# Altium footprint library 0805_1%_Resistor.PcbLib: 20 footprints (part 1 of 2)
Each footprint in its own frame and in the unit in brackets; x right, y up, seen from the top. Pads: shape width x height; smd on the part's side, far side on the other; paste and mask are expansions set on the pad; w line width, h text height; cw(c..) or ccw(c..) is an arc to the next point about the centre after c.
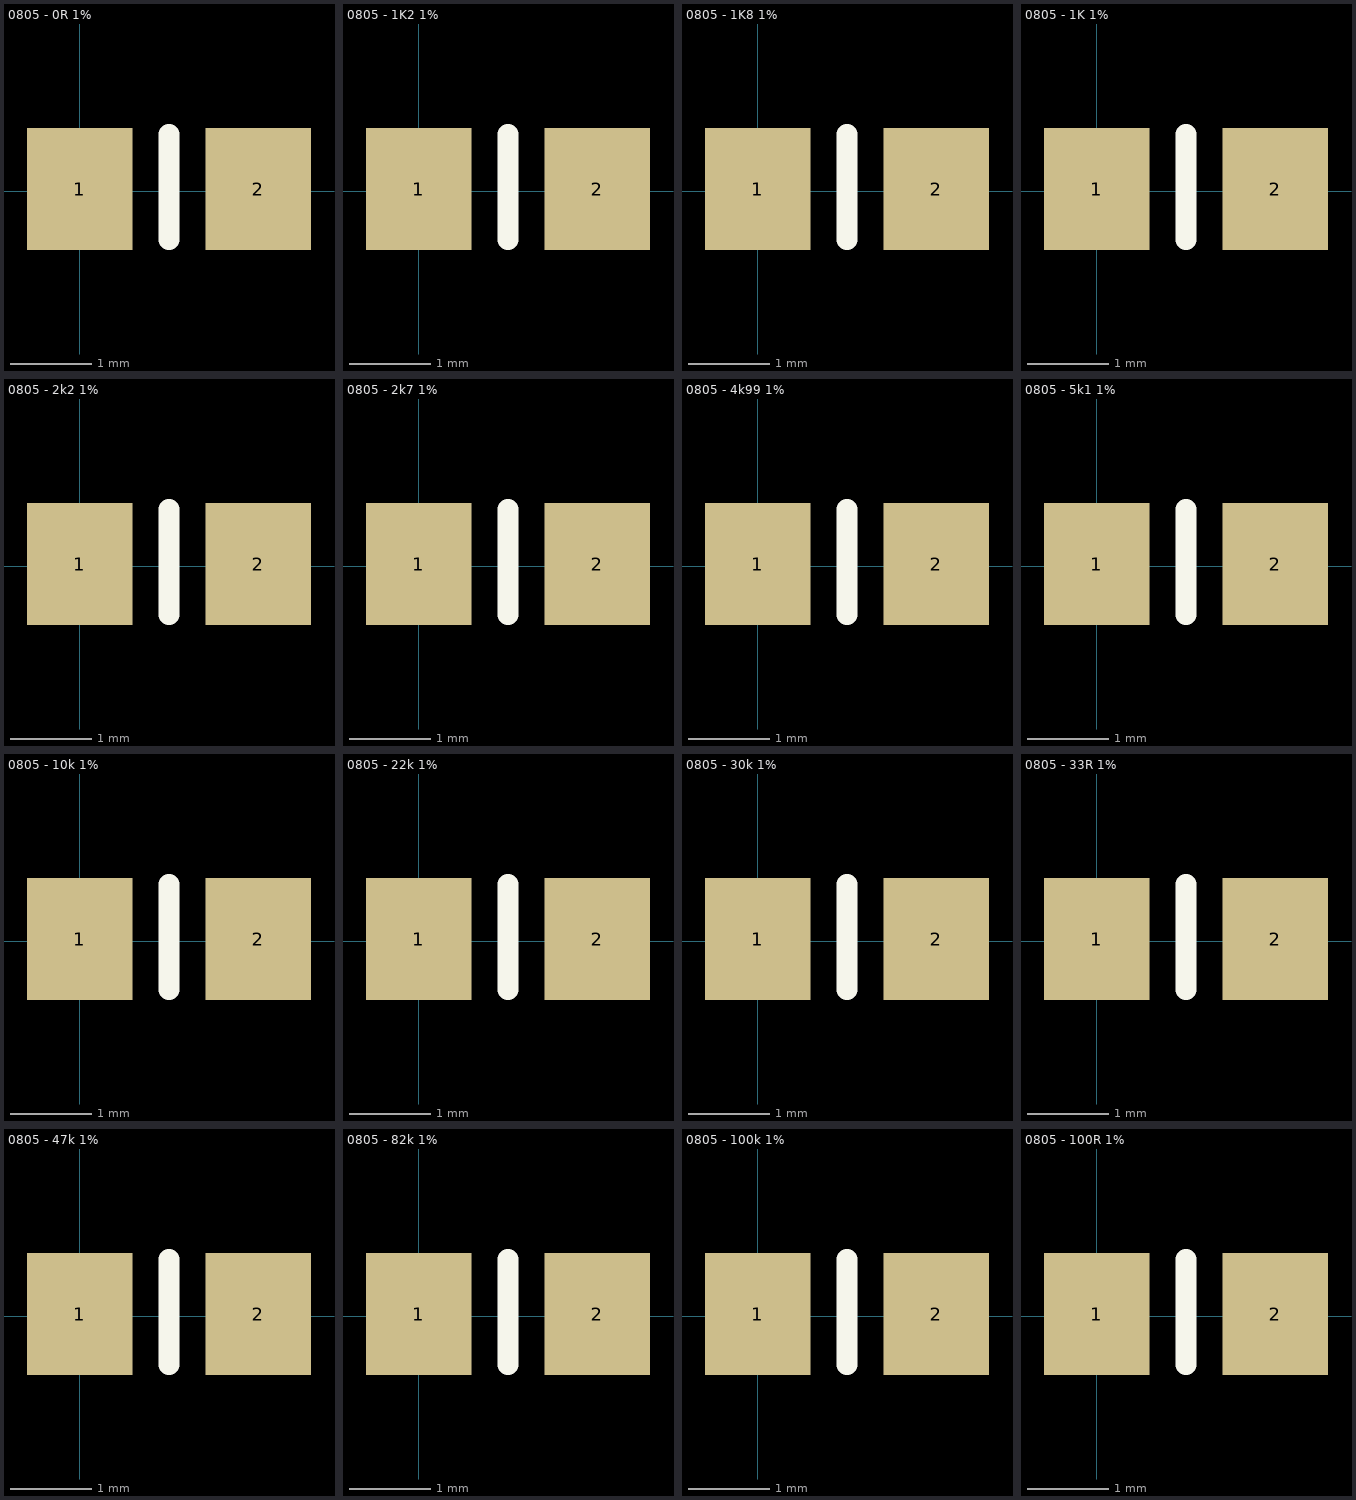
[diagram p0: the footprints below, top view; thin cyan lines are the x and y axes]

## 0805 - 0R 1% [mm]
pads (2):
  rect 1.3x1.5 smd: 1(0,0.025) 2(2.2,0.025)
Top Overlay:
  lines w0.254: 1.1,-0.6 1.1,0.7
3D body "0R.STEP": height 0.43, standoff -0.02, extent 0.125,-0.6 2.125,0.65

## 0805 - 1K2 1% [mm]
pads (2):
  rect 1.3x1.5 smd: 1(0,0.025) 2(2.2,0.025)
Top Overlay:
  lines w0.254: 1.1,-0.6 1.1,0.7
3D body "1k2.STEP": height 0.43, standoff -0.02, extent 0.125,-0.6 2.125,0.65

## 0805 - 1K8 1% [mm]
pads (2):
  rect 1.3x1.5 smd: 1(0,0.025) 2(2.2,0.025)
Top Overlay:
  lines w0.254: 1.1,-0.6 1.1,0.7
3D body "1k8 1%.STEP": height 0.43, standoff -0.02, extent 0.125,-0.6 2.125,0.65

## 0805 - 1K 1% [mm]
pads (2):
  rect 1.3x1.5 smd: 1(0,0.025) 2(2.2,0.025)
Top Overlay:
  lines w0.254: 1.1,-0.6 1.1,0.7
3D body "1k 1%.STEP": height 0.43, standoff -0.02, extent 0.125,-0.6 2.125,0.65

## 0805 - 2k2 1% [mm]
pads (2):
  rect 1.3x1.5 smd: 1(0,0.025) 2(2.2,0.025)
Top Overlay:
  lines w0.254: 1.1,-0.6 1.1,0.7
3D body "2k2.STEP": height 0.43, standoff -0.02, extent 0.125,-0.6 2.125,0.65

## 0805 - 2k7 1% [mm]
pads (2):
  rect 1.3x1.5 smd: 1(0,0.025) 2(2.2,0.025)
Top Overlay:
  lines w0.254: 1.1,-0.6 1.1,0.7
3D body "2k7 1%.STEP": height 0.43, standoff -0.02, extent 0.125,-0.6 2.125,0.65

## 0805 - 4k99 1% [mm]
pads (2):
  rect 1.3x1.5 smd: 1(0,0.025) 2(2.2,0.025)
Top Overlay:
  lines w0.254: 1.1,-0.6 1.1,0.7
3D body "4k99.STEP": height 0.43, standoff -0.02, extent 0.125,-0.6 2.125,0.65

## 0805 - 5k1 1% [mm]
pads (2):
  rect 1.3x1.5 smd: 1(0,0.025) 2(2.2,0.025)
Top Overlay:
  lines w0.254: 1.1,-0.6 1.1,0.7
3D body "5k1.STEP": height 0.43, standoff -0.02, extent 0.125,-0.6 2.125,0.65

## 0805 - 10k 1% [mm]
pads (2):
  rect 1.3x1.5 smd: 1(0,0.025) 2(2.2,0.025)
Top Overlay:
  lines w0.254: 1.1,-0.6 1.1,0.7
3D body "10k.STEP": height 0.43, standoff -0.02, extent 0.125,-0.6 2.125,0.65

## 0805 - 22k 1% [mm]
pads (2):
  rect 1.3x1.5 smd: 1(0,0.025) 2(2.2,0.025)
Top Overlay:
  lines w0.254: 1.1,-0.6 1.1,0.7
3D body "22k 1%.STEP": height 0.43, standoff -0.02, extent 0.125,-0.6 2.125,0.65

## 0805 - 30k 1% [mm]
pads (2):
  rect 1.3x1.5 smd: 1(0,0.025) 2(2.2,0.025)
Top Overlay:
  lines w0.254: 1.1,-0.6 1.1,0.7
3D body "30k 1%.STEP": height 0.43, standoff -0.02, extent 0.125,-0.6 2.125,0.65

## 0805 - 33R 1% [mm]
pads (2):
  rect 1.3x1.5 smd: 1(0,0.025) 2(2.2,0.025)
Top Overlay:
  lines w0.254: 1.1,-0.6 1.1,0.7
3D body "33R 1%.STEP": height 0.43, standoff -0.02, extent 0.125,-0.6 2.125,0.65

## 0805 - 47k 1% [mm]
pads (2):
  rect 1.3x1.5 smd: 1(0,0.025) 2(2.2,0.025)
Top Overlay:
  lines w0.254: 1.1,-0.6 1.1,0.7
3D body "47k 1%.STEP": height 0.43, standoff -0.02, extent 0.125,-0.6 2.125,0.65

## 0805 - 82k 1% [mm]
pads (2):
  rect 1.3x1.5 smd: 1(0,0.025) 2(2.2,0.025)
Top Overlay:
  lines w0.254: 1.1,-0.6 1.1,0.7
3D body "82k 1%.STEP": height 0.43, standoff -0.02, extent 0.125,-0.6 2.125,0.65

## 0805 - 100k 1% [mm]
pads (2):
  rect 1.3x1.5 smd: 1(0,0.025) 2(2.2,0.025)
Top Overlay:
  lines w0.254: 1.1,-0.6 1.1,0.7
3D body "100k 1%.STEP": height 0.43, standoff -0.02, extent 0.125,-0.6 2.125,0.65

## 0805 - 100R 1% [mm]
pads (2):
  rect 1.3x1.5 smd: 1(0,0.025) 2(2.2,0.025)
Top Overlay:
  lines w0.254: 1.1,-0.6 1.1,0.7
3D body "100R 1%.STEP": height 0.43, standoff -0.02, extent 0.125,-0.6 2.125,0.65